# Altium schematic symbol library sarmixer.SchLib: 11 symbols
Pins are listed as number, name and electrical type; pins without a type are passive.

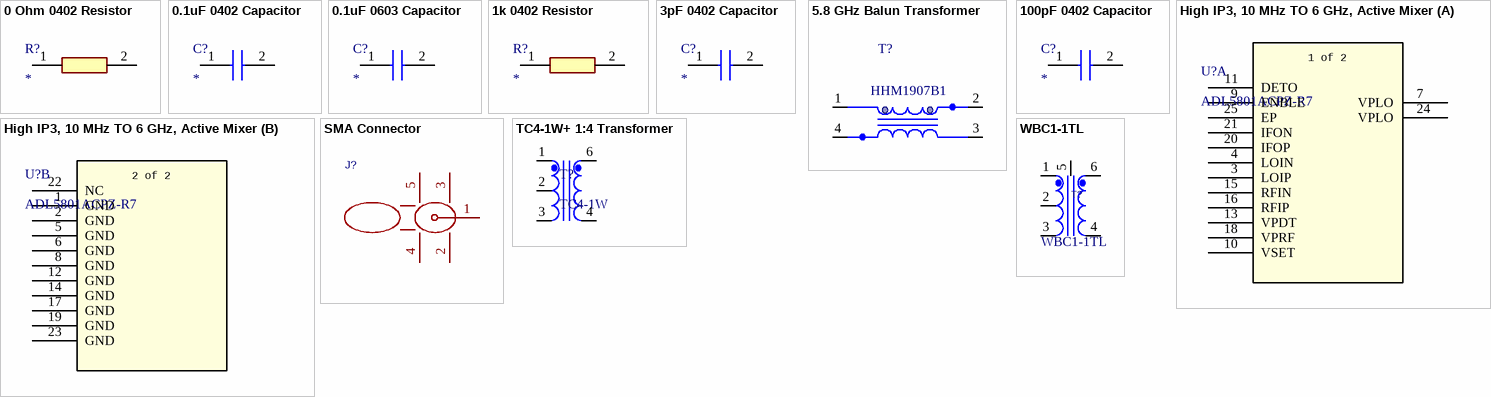
[diagram p0: symbols 0 Ohm 0402 Resistor to WBC1-1TL]

## 0 Ohm 0402 Resistor
designator R?
RC0402JR-070RL; Manufacturer_Name: Yageo Group; Datasheet Link: https://www.yageo.com/upload/media/product/products/datasheet/rchip/PYu-RC_Group_51_RoHS_L_12.pdf; Height: 0.4mm; Manufacturer_Part_Number: RC0402JR-070RL; Mouser Part Number: 603-RC0402JR-070RL; Mouser Price/Stock: https://www.mouser.co.uk/ProductDetail/YAGEO/RC0402JR-070RL?qs=5Bml4Cp94iv7ykKkzPrwpQ%3D%3D; Arrow Part Number: RC0402JR-070RL; Arrow Price/Stock: https://www.arrow.com/en/products/rc0402jr-070rl/yageo.html?utm_currency=USD&region=asia
footprint RESC1005X40N
pins: 1, 2

## 0.1uF 0402 Capacitor
designator C?
C0402C104K4RACTU; Manufacturer_Name: Yageo Group; Datasheet Link: https://content.kemet.com/datasheets/KEM_C1002_X7R_SMD.pdf; Height: 0.55mm; Manufacturer_Part_Number: C0402C104K4RACTU; Mouser Part Number: 80-C0402C104K4R; Mouser Price/Stock: https://www.mouser.co.uk/ProductDetail/KEMET/C0402C104K4RACTU?qs=DBJr%252BvBUjU54jK7d4uAeew%3D%3D; Arrow Part Number: C0402C104K4RACTU; Arrow Price/Stock: https://www.arrow.com/en/products/c0402c104k4ractu/kemet-corporation.html?utm_currency=USD&region=nac
footprint C0402C104J4RACTU
pins: 1, 2

## 0.1uF 0603 Capacitor
designator C?
C0603C104K4RACAUTO; Manufacturer_Name: Yageo Group; Datasheet Link: https://content.kemet.com/datasheets/KEM_C1023_X7R_AUTO_SMD.pdf; Height: 0.87mm; Manufacturer_Part_Number: C0603C104K4RACAUTO; Mouser Part Number: 80-C0603C104K4RAUTO; Mouser Price/Stock: https://www.mouser.co.uk/ProductDetail/KEMET/C0603C104K4RACAUTO?qs=OHu5RF0w3Qq6uXbO9XN%2FyA%3D%3D; Arrow Part Number: C0603C104K4RACAUTO; Arrow Price/Stock: https://www.arrow.com/en/products/c0603c104k4racauto/kemet-corporation?region=nac
footprint C0603
pins: 1, 2

## 1k 0402 Resistor
designator R?
RC0402FR-071KL; Manufacturer_Name: Yageo Group; Datasheet Link: https://yageogroup.com/products/Resistors/part/RC0402FR-071KL; Height: 0.4mm; Manufacturer_Part_Number: RC0402FR-071KL; Mouser Part Number: 603-RC0402FR-071KL; Mouser Price/Stock: https://www.mouser.co.uk/ProductDetail/YAGEO/RC0402FR-071KL?qs=V1yeUXFNrknDEmWLmm5v6g%3D%3D; Arrow Part Number: RC0402FR-071KL; Arrow Price/Stock: https://www.arrow.com/en/products/rc0402fr-071kl/yageo.html?utm_currency=USD&region=asia
footprint RESC1005X40N
pins: 1, 2

## 3pF 0402 Capacitor
designator C?
GJM1555C1H3R0BB01D; Manufacturer_Name: Murata Electronics; Datasheet Link: https://search.murata.co.jp/Ceramy/image/img/A01X/G101/ENG/GJM1555C1H3R0BB01-01A.pdf; Height: 0.55mm; Manufacturer_Part_Number: GJM1555C1H3R0BB01D; Mouser Part Number: 81-GJM1555C1H3R0BB01; Mouser Price/Stock: https://www.mouser.co.uk/ProductDetail/Murata-Electronics/GJM1555C1H3R0BB01D?qs=fOe5G3t%252BQHoZjxUrLCJNQQ%3D%3D; Arrow Part Number: GJM1555C1H3R0BB01D; Arrow Price/Stock: https://www.arrow.com/en/products/gjm1555c1h3r0bb01d/murata-manufacturing
footprint CAPC1005X55N
pins: 1, 2

## 5.8 GHz Balun Transformer
designator T?, comment HHM1907B1
MANF: Mini-Circuit; PARAM: 10~6000MHz; DESC: DESCRIPTION; MANF_P#: TCM1-63AX+; PARAM2: 0.2W, 30mA, -40~85oC; ASSEMBLY: ASSEMBLY; PRICE: PRICE; VALUE: HHM1907B1
footprint HHM1907B1
pins: 1 UNBAL, 2 BALANCED_1, 3 BALANCED_2, 4 GND
2 alternate drawings of the same symbol

## 100pF 0402 Capacitor
designator C?
GRM1555C1H101JA01J; Manufacturer_Name: Murata Electronics; Datasheet Link: https://search.murata.co.jp/Ceramy/image/img/A01X/G101/ENG/GRM1555C1H101JA01-01A.pdf; Height: 0.7mm; Manufacturer_Part_Number: GRM1555C1H101JA01J; Mouser Part Number: 81-GRM1555C1H101JA1J; Mouser Price/Stock: https://www.mouser.co.uk/ProductDetail/Murata-Electronics/GRM1555C1H101JA01J?qs=ouTquLLW2S6yVyqkMCWoRg%3D%3D; Arrow Part Number: GRM1555C1H101JA01J; Arrow Price/Stock: https://www.arrow.com/en/products/grm1555c1h101ja01j/murata-manufacturing?utm_currency=USD&region=nac
footprint CAPC1005X70N
pins: 1, 2

## High IP3, 10 MHz TO 6 GHz, Active Mixer
designator U?, comment ADL5801ACPZ-R7
Manufacturer_Name: Analog Devices Inc; Copyright: Copyright (C) 2026 Ultra Librarian. All rights reserved.; Manufacturer_Part_Number: ADL5801ACPZ-R7; Datasheet: https://www.analog.com/media/en/technical-documentation/data-sheets/ADL5801.pdf; RefDes: RefDes; Type: Type
footprint CP_24_3_ADI
part A pins: 3 LOIP, 4 LOIN, 7 VPLO, 9 ENBLE, 10 VSET, 11 DETO, 13 VPDT, 15 RFIN, 16 RFIP, 18 VPRF, 20 IFOP, 21 IFON, 24 VPLO, 25 EP
part B pins: 1 GND, 2 GND, 5 GND, 6 GND, 8 GND, 12 GND, 14 GND, 17 GND, 19 GND, 22 NC, 23 GND
part A text: 1 of 2
part B text: 2 of 2

## SMA Connector
designator J?
732511153; Manufacturer: MOLEX; AddInBom: yes; Connector Type: Board Side; Number of Ports: 1; Value: 18GHz; RF Series: SMA; Impedance: 50Ω; Rated Voltage (Max): 500V; Symbol: 732511153; Device: 732511153; LCSC Part Name: SMA; SupplierPart: C5859238; ManufacturerPart: 732511153; Supplier Footprint: -; JLCPCB Part Class: Extended Part; Supplier: LCSC; ConvertToPcb: yes; FootprintName: SMA-SMD_732511153
footprint SMA-SMD_732511153
pins: 1, 2, 3, 4, 5

## TC4-1W+ 1:4 Transformer
designator T?, comment TC4-1W
TC4-1W+; Manufacturer_Name: Mini Circuits; Copyright: Copyright (C) 2026 Ultra Librarian. All rights reserved.; Manufacturer_Part_Number: TC4-1W; RefDes: RefDes; Type: Type
footprint AT224_MNC
pins: 1 PRIDOT, 2 PRICT, 3 PRI, 4 SEC, 6 SECDOT

## WBC1-1TL
designator T?
RF Transformer, 1:1, 50Ohm, 0.25~750MHz; MANF: Coilcraft; PARAM2: 36mA; MANF_P#: WBC1-1TL; PARAM: 1:1, 50Ohm, 0.25~750MHz; PRICE: 5$; VALUE: WBC1-1TL
footprint AT224_MNC
pins: 1 PRIDOT, 2 PRICT, 3 PRI, 4 SEC, 5 NC, 6 SECDOT